# Altium integrated library GPDSE.IntLib: 426 symbols (part 4 of 5)
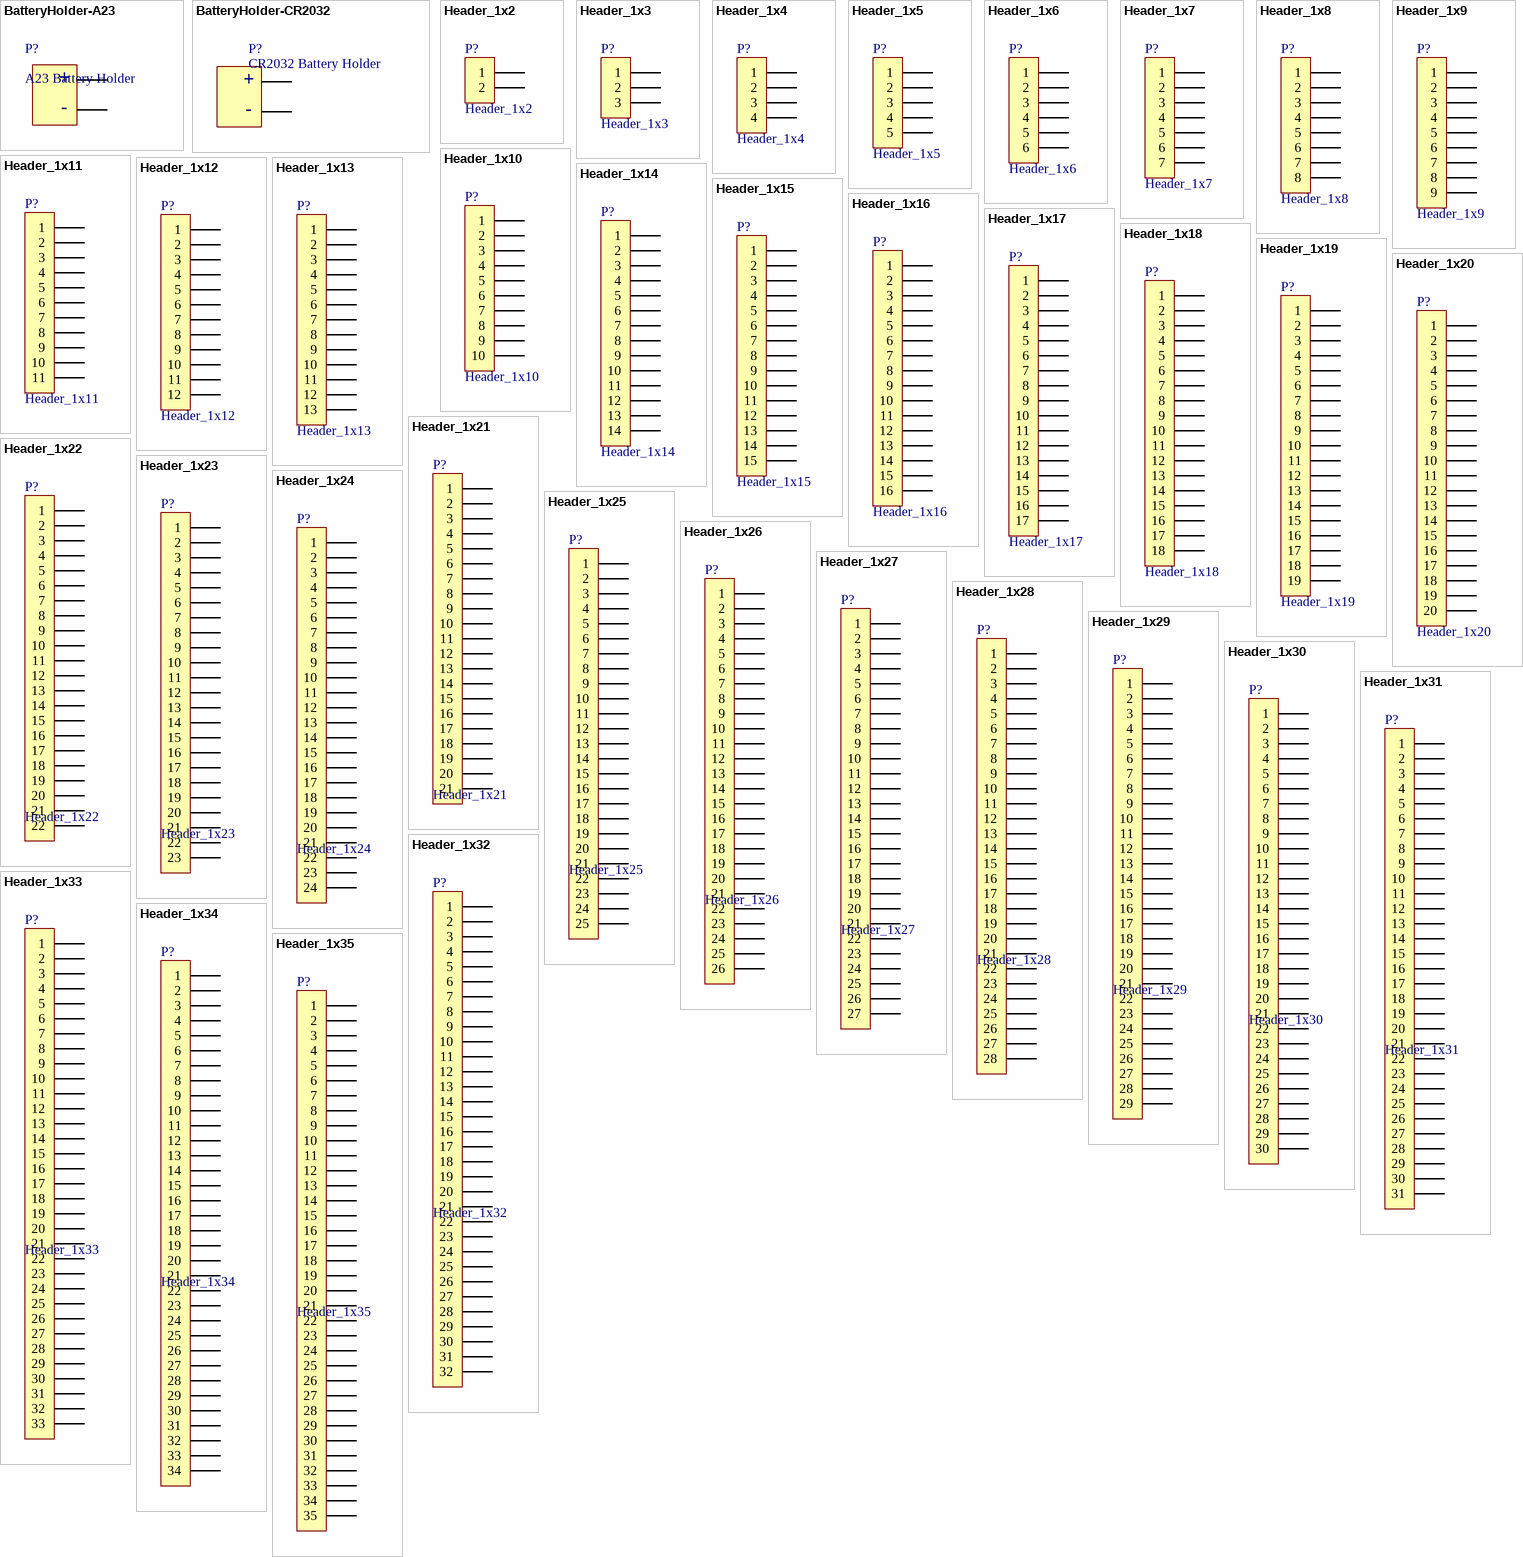
[diagram p29: symbols BatteryHolder-A23 to Header_1x35]

## Header_1x3
designator P?
Header, 1 Line, 3 Columns, 3 Pins; LatestRevisionDate: 17-Jul-2002; LatestRevisionNote: Re-released for DXP Platform.; Publisher: Altium Limited
footprint HDR-M-1x3-2.54mm-180-9.2mm (Male Header, 1 line 3 rows, 180 degrees, 9.2 mm length)
footprint HDR-M-1x3-2.54mm-180-11.2mm (Male Header, 1 line 3 rows, 180 degrees, 11.2 mm length)
footprint HDR-M-1x3-2.54mm-180-11.6mm (Male Header, 1 line 3 rows, 180 degrees, 11.6 mm length)
footprint HDR-M-1x3-2.54mm-180-12.4mm (Male Header, 1 line 3 rows, 180 degrees, 12.4 mm length)
footprint HDR-M-1x3-2.54mm-180-13.6mm (Male Header, 1 line 3 rows, 180 degrees, 13.6 mm length)
footprint HDR-M-1x3-2.54mm-180-21.1mm (Male Header, 1 line 3 rows, 180 degrees, 21.1 mm length)
footprint HDR-F-1x3-2.54mm-180-8.7mm (Female Header, 1 line 3 rows, 180 degrees, 8.7 mm length)
pins: 1, 2, 3

## Header_1x4
designator P?
Header, 1 Line, 4 Columns, 4 Pins; LatestRevisionDate: 17-Jul-2002; LatestRevisionNote: Re-released for DXP Platform.; Publisher: Altium Limited
footprint HDR-M-1x4-2.54mm-180-9.2mm (Male Header, 1 line 4 rows, 180 degrees, 9.2 mm length)
footprint HDR-M-1x4-2.54mm-180-11.2mm (Male Header, 1 line 4 rows, 180 degrees, 11.2 mm length)
footprint HDR-M-1x4-2.54mm-180-11.6mm (Male Header, 1 line 4 rows, 180 degrees, 11.6 mm length)
footprint HDR-M-1x4-2.54mm-180-12.4mm (Male Header, 1 line 4 rows, 180 degrees, 12.4 mm length)
footprint HDR-M-1x4-2.54mm-180-13.6mm (Male Header, 1 line 4 rows, 180 degrees, 13.6 mm length)
footprint HDR-M-1x4-2.54mm-180-21.1mm (Male Header, 1 line 4 rows, 180 degrees, 21.1 mm length)
footprint HDR-F-1x4-2.54mm-180-8.7mm (Female Header, 1 line 4 rows, 180 degrees, 8.7 mm length)
pins: 1, 2, 3, 4

## Header_1x5
designator P?
Header, 1 Line, 5 Columns, 5 Pins; LatestRevisionDate: 17-Jul-2002; LatestRevisionNote: Re-released for DXP Platform.; Publisher: Altium Limited
footprint HDR-M-1x5-2.54mm-180-9.2mm (Male Header, 1 line 5 rows, 180 degrees, 9.2 mm length)
footprint HDR-M-1x5-2.54mm-180-11.2mm (Male Header, 1 line 5 rows, 180 degrees, 11.2 mm length)
footprint HDR-M-1x5-2.54mm-180-11.6mm (Male Header, 1 line 5 rows, 180 degrees, 11.6 mm length)
footprint HDR-M-1x5-2.54mm-180-12.4mm (Male Header, 1 line 5 rows, 180 degrees, 12.4 mm length)
footprint HDR-M-1x5-2.54mm-180-13.6mm (Male Header, 1 line 5 rows, 180 degrees, 13.6 mm length)
footprint HDR-M-1x5-2.54mm-180-21.1mm (Male Header, 1 line 5 rows, 180 degrees, 21.1 mm length)
footprint HDR-F-1x5-2.54mm-180-8.7mm (Female Header, 1 line 5 rows, 180 degrees, 8.7 mm length)
pins: 1, 2, 3, 4, 5

## Header_1x6
designator P?
Header, 1 Line, 6 Columns, 6 Pins; LatestRevisionDate: 17-Jul-2002; LatestRevisionNote: Re-released for DXP Platform.; Publisher: Altium Limited
footprint HDR-M-1x6-2.54mm-180-9.2mm (Male Header, 1 line 6 rows, 180 degrees, 9.2 mm length)
footprint HDR-M-1x6-2.54mm-180-11.2mm (Male Header, 1 line 6 rows, 180 degrees, 11.2 mm length)
footprint HDR-M-1x6-2.54mm-180-11.6mm (Male Header, 1 line 6 rows, 180 degrees, 11.6 mm length)
footprint HDR-M-1x6-2.54mm-180-12.4mm (Male Header, 1 line 6 rows, 180 degrees, 12.4 mm length)
footprint HDR-M-1x6-2.54mm-180-13.6mm (Male Header, 1 line 6 rows, 180 degrees, 13.6 mm length)
footprint HDR-M-1x6-2.54mm-180-21.1mm (Male Header, 1 line 6 rows, 180 degrees, 21.1 mm length)
footprint HDR-F-1x6-2.54mm-180-8.7mm (Female Header, 1 line 6 rows, 180 degrees, 8.7 mm length)
pins: 1, 2, 3, 4, 5, 6

## Header_1x7
designator P?
Header, 1 Line, 7 Columns, 7 Pins; LatestRevisionDate: 17-Jul-2002; LatestRevisionNote: Re-released for DXP Platform.; Publisher: Altium Limited
footprint HDR-M-1x7-2.54mm-180-9.2mm (Male Header, 1 line 7 rows, 180 degrees, 9.2 mm length)
footprint HDR-M-1x7-2.54mm-180-11.2mm (Male Header, 1 line 7 rows, 180 degrees, 11.2 mm length)
footprint HDR-M-1x7-2.54mm-180-11.6mm (Male Header, 1 line 7 rows, 180 degrees, 11.6 mm length)
footprint HDR-M-1x7-2.54mm-180-12.4mm (Male Header, 1 line 7 rows, 180 degrees, 12.4 mm length)
footprint HDR-M-1x7-2.54mm-180-13.6mm (Male Header, 1 line 7 rows, 180 degrees, 13.6 mm length)
footprint HDR-M-1x7-2.54mm-180-21.1mm (Male Header, 1 line 7 rows, 180 degrees, 21.1 mm length)
footprint HDR-F-1x7-2.54mm-180-8.7mm (Female Header, 1 line 7 rows, 180 degrees, 8.7 mm length)
pins: 1, 2, 3, 4, 5, 6, 7

## Header_1x8
designator P?
Header, 1 Line, 8 Columns, 8 Pins; LatestRevisionDate: 17-Jul-2002; LatestRevisionNote: Re-released for DXP Platform.; Publisher: Altium Limited
footprint HDR-M-1x8-2.54mm-180-9.2mm (Male Header, 1 line 8 rows, 180 degrees, 9.2 mm length)
footprint HDR-M-1x8-2.54mm-180-11.2mm (Male Header, 1 line 8 rows, 180 degrees, 11.2 mm length)
footprint HDR-M-1x8-2.54mm-180-11.6mm (Male Header, 1 line 8 rows, 180 degrees, 11.6 mm length)
footprint HDR-M-1x8-2.54mm-180-12.4mm (Male Header, 1 line 8 rows, 180 degrees, 12.4 mm length)
footprint HDR-M-1x8-2.54mm-180-13.6mm (Male Header, 1 line 8 rows, 180 degrees, 13.6 mm length)
footprint HDR-M-1x8-2.54mm-180-21.1mm (Male Header, 1 line 8 rows, 180 degrees, 21.1 mm length)
footprint HDR-F-1x8-2.54mm-180-8.7mm (Female Header, 1 line 8 rows, 180 degrees, 8.7 mm length)
pins: 1, 2, 3, 4, 5, 6, 7, 8

## Header_1x9
designator P?
Header, 1 Line, 9 Columns, 9 Pins; LatestRevisionDate: 17-Jul-2002; LatestRevisionNote: Re-released for DXP Platform.; Publisher: Altium Limited
footprint HDR-M-1x9-2.54mm-180-9.2mm (Male Header, 1 line 9 rows, 180 degrees, 9.2 mm length)
footprint HDR-M-1x9-2.54mm-180-11.2mm (Male Header, 1 line 9 rows, 180 degrees, 11.2 mm length)
footprint HDR-M-1x9-2.54mm-180-11.6mm (Male Header, 1 line 9 rows, 180 degrees, 11.6 mm length)
footprint HDR-M-1x9-2.54mm-180-12.4mm (Male Header, 1 line 9 rows, 180 degrees, 12.4 mm length)
footprint HDR-M-1x9-2.54mm-180-13.6mm (Male Header, 1 line 9 rows, 180 degrees, 13.6 mm length)
footprint HDR-M-1x9-2.54mm-180-21.1mm (Male Header, 1 line 9 rows, 180 degrees, 21.1 mm length)
footprint HDR-F-1x9-2.54mm-180-8.7mm (Female Header, 1 line 9 rows, 180 degrees, 8.7 mm length)
pins: 1, 2, 3, 4, 5, 6, 7, 8, 9

## Header_1x10
designator P?
Header, 1 Line, 10 Columns, 10 Pins; LatestRevisionDate: 17-Jul-2002; LatestRevisionNote: Re-released for DXP Platform.; Publisher: Altium Limited
footprint HDR-M-1x10-2.54mm-180-9.2mm (Male Header, 1 line 10 rows, 180 degrees, 9.2 mm length)
footprint HDR-M-1x10-2.54mm-180-11.2mm (Male Header, 1 line 10 rows, 180 degrees, 11.2 mm length)
footprint HDR-M-1x10-2.54mm-180-11.6mm (Male Header, 1 line 10 rows, 180 degrees, 11.6 mm length)
footprint HDR-M-1x10-2.54mm-180-12.4mm (Male Header, 1 line 10 rows, 180 degrees, 12.4 mm length)
footprint HDR-M-1x10-2.54mm-180-13.6mm (Male Header, 1 line 10 rows, 180 degrees, 13.6 mm length)
footprint HDR-M-1x10-2.54mm-180-21.1mm (Male Header, 1 line 10 rows, 180 degrees, 21.1 mm length)
footprint HDR-F-1x10-2.54mm-180-8.7mm (Female Header, 1 line 10 rows, 180 degrees, 8.7 mm length)
pins: 1, 2, 3, 4, 5, 6, 7, 8, 9, 10

## Header_1x11
designator P?
Header, 1 Line, 11 Columns, 11 Pins; LatestRevisionDate: 17-Jul-2002; LatestRevisionNote: Re-released for DXP Platform.; Publisher: Altium Limited
footprint HDR-M-1x11-2.54mm-180-9.2mm (Male Header, 1 line 11 rows, 180 degrees, 9.2 mm length)
footprint HDR-M-1x11-2.54mm-180-11.2mm (Male Header, 1 line 11 rows, 180 degrees, 11.2 mm length)
footprint HDR-M-1x11-2.54mm-180-11.6mm (Male Header, 1 line 11 rows, 180 degrees, 11.6 mm length)
footprint HDR-M-1x11-2.54mm-180-12.4mm (Male Header, 1 line 11 rows, 180 degrees, 12.4 mm length)
footprint HDR-M-1x11-2.54mm-180-13.6mm (Male Header, 1 line 11 rows, 180 degrees, 13.6 mm length)
footprint HDR-M-1x11-2.54mm-180-21.1mm (Male Header, 1 line 11 rows, 180 degrees, 21.1 mm length)
footprint HDR-F-1x11-2.54mm-180-8.7mm (Female Header, 1 line 11 rows, 180 degrees, 8.7 mm length)
pins: 1, 2, 3, 4, 5, 6, 7, 8, 9, 10, 11

## Header_1x12
designator P?
Header, 1 Line, 12 Columns, 12 Pins; LatestRevisionDate: 17-Jul-2002; LatestRevisionNote: Re-released for DXP Platform.; Publisher: Altium Limited
footprint HDR-M-1x12-2.54mm-180-9.2mm (Male Header, 1 line 12 rows, 180 degrees, 9.2 mm length)
footprint HDR-M-1x12-2.54mm-180-11.2mm (Male Header, 1 line 12 rows, 180 degrees, 11.2 mm length)
footprint HDR-M-1x12-2.54mm-180-11.6mm (Male Header, 1 line 12 rows, 180 degrees, 11.6 mm length)
footprint HDR-M-1x12-2.54mm-180-12.4mm (Male Header, 1 line 12 rows, 180 degrees, 12.4 mm length)
footprint HDR-M-1x12-2.54mm-180-13.6mm (Male Header, 1 line 12 rows, 180 degrees, 13.6 mm length)
footprint HDR-M-1x12-2.54mm-180-21.1mm (Male Header, 1 line 12 rows, 180 degrees, 21.1 mm length)
footprint HDR-F-1x12-2.54mm-180-8.7mm (Female Header, 1 line 12 rows, 180 degrees, 8.7 mm length)
pins: 1, 2, 3, 4, 5, 6, 7, 8, 9, 10, 11, 12

## Header_1x13
designator P?
Header, 1 Line, 13 Columns, 13 Pins; LatestRevisionDate: 17-Jul-2002; LatestRevisionNote: Re-released for DXP Platform.; Publisher: Altium Limited
footprint HDR-M-1x13-2.54mm-180-9.2mm (Male Header, 1 line 13 rows, 180 degrees, 9.2 mm length)
footprint HDR-M-1x13-2.54mm-180-11.2mm (Male Header, 1 line 13 rows, 180 degrees, 11.2 mm length)
footprint HDR-M-1x13-2.54mm-180-11.6mm (Male Header, 1 line 13 rows, 180 degrees, 11.6 mm length)
footprint HDR-M-1x13-2.54mm-180-12.4mm (Male Header, 1 line 13 rows, 180 degrees, 12.4 mm length)
footprint HDR-M-1x13-2.54mm-180-13.6mm (Male Header, 1 line 13 rows, 180 degrees, 13.6 mm length)
footprint HDR-M-1x13-2.54mm-180-21.1mm (Male Header, 1 line 13 rows, 180 degrees, 21.1 mm length)
footprint HDR-F-1x13-2.54mm-180-8.7mm (Female Header, 1 line 13 rows, 180 degrees, 8.7 mm length)
pins: 1, 2, 3, 4, 5, 6, 7, 8, 9, 10, 11, 12, 13

## Header_1x14
designator P?
Header, 1 Line, 14 Columns, 14 Pins; LatestRevisionDate: 17-Jul-2002; LatestRevisionNote: Re-released for DXP Platform.; Publisher: Altium Limited
footprint HDR-M-1x14-2.54mm-180-9.2mm (Male Header, 1 line 14 rows, 180 degrees, 9.2 mm length)
footprint HDR-M-1x14-2.54mm-180-11.2mm (Male Header, 1 line 14 rows, 180 degrees, 11.2 mm length)
footprint HDR-M-1x14-2.54mm-180-11.6mm (Male Header, 1 line 14 rows, 180 degrees, 11.6 mm length)
footprint HDR-M-1x14-2.54mm-180-12.4mm (Male Header, 1 line 14 rows, 180 degrees, 12.4 mm length)
footprint HDR-M-1x14-2.54mm-180-13.6mm (Male Header, 1 line 14 rows, 180 degrees, 13.6 mm length)
footprint HDR-M-1x14-2.54mm-180-21.1mm (Male Header, 1 line 14 rows, 180 degrees, 21.1 mm length)
footprint HDR-F-1x14-2.54mm-180-8.7mm (Female Header, 1 line 14 rows, 180 degrees, 8.7 mm length)
pins: 1, 2, 3, 4, 5, 6, 7, 8, 9, 10, 11, 12, 13, 14

## Header_1x15
designator P?
Header, 1 Line, 15 Columns, 15 Pins; LatestRevisionDate: 17-Jul-2002; LatestRevisionNote: Re-released for DXP Platform.; Publisher: Altium Limited
footprint HDR-M-1x15-2.54mm-180-9.2mm (Male Header, 1 line 15 rows, 180 degrees, 9.2 mm length)
footprint HDR-M-1x15-2.54mm-180-11.2mm (Male Header, 1 line 15 rows, 180 degrees, 11.2 mm length)
footprint HDR-M-1x15-2.54mm-180-11.6mm (Male Header, 1 line 15 rows, 180 degrees, 11.6 mm length)
footprint HDR-M-1x15-2.54mm-180-12.4mm (Male Header, 1 line 15 rows, 180 degrees, 12.4 mm length)
footprint HDR-M-1x15-2.54mm-180-13.6mm (Male Header, 1 line 15 rows, 180 degrees, 13.6 mm length)
footprint HDR-M-1x15-2.54mm-180-21.1mm (Male Header, 1 line 15 rows, 180 degrees, 21.1 mm length)
footprint HDR-F-1x15-2.54mm-180-8.7mm (Female Header, 1 line 15 rows, 180 degrees, 8.7 mm length)
pins: 1, 2, 3, 4, 5, 6, 7, 8, 9, 10, 11, 12, 13, 14, 15

## Header_1x16
designator P?
Header, 1 Line, 16 Columns, 16 Pins; LatestRevisionDate: 17-Jul-2002; LatestRevisionNote: Re-released for DXP Platform.; Publisher: Altium Limited
footprint HDR-M-1x16-2.54mm-180-9.2mm (Male Header, 1 line 16 rows, 180 degrees, 9.2 mm length)
footprint HDR-M-1x16-2.54mm-180-11.2mm (Male Header, 1 line 16 rows, 180 degrees, 11.2 mm length)
footprint HDR-M-1x16-2.54mm-180-11.6mm (Male Header, 1 line 16 rows, 180 degrees, 11.6 mm length)
footprint HDR-M-1x16-2.54mm-180-12.4mm (Male Header, 1 line 16 rows, 180 degrees, 12.4 mm length)
footprint HDR-M-1x16-2.54mm-180-13.6mm (Male Header, 1 line 16 rows, 180 degrees, 13.6 mm length)
footprint HDR-M-1x16-2.54mm-180-21.1mm (Male Header, 1 line 16 rows, 180 degrees, 21.1 mm length)
footprint HDR-F-1x16-2.54mm-180-8.7mm (Female Header, 1 line 16 rows, 180 degrees, 8.7 mm length)
pins: 1, 2, 3, 4, 5, 6, 7, 8, 9, 10, 11, 12, 13, 14, 15, 16

## Header_1x17
designator P?
Header, 1 Line, 17 Columns, 17 Pins; LatestRevisionDate: 17-Jul-2002; LatestRevisionNote: Re-released for DXP Platform.; Publisher: Altium Limited
footprint HDR-M-1x17-2.54mm-180-9.2mm (Male Header, 1 line 17 rows, 180 degrees, 9.2 mm length)
footprint HDR-M-1x17-2.54mm-180-11.2mm (Male Header, 1 line 17 rows, 180 degrees, 11.2 mm length)
footprint HDR-M-1x17-2.54mm-180-11.6mm (Male Header, 1 line 17 rows, 180 degrees, 11.6 mm length)
footprint HDR-M-1x17-2.54mm-180-12.4mm (Male Header, 1 line 17 rows, 180 degrees, 12.4 mm length)
footprint HDR-M-1x17-2.54mm-180-13.6mm (Male Header, 1 line 17 rows, 180 degrees, 13.6 mm length)
footprint HDR-M-1x17-2.54mm-180-21.1mm (Male Header, 1 line 17 rows, 180 degrees, 21.1 mm length)
footprint HDR-F-1x17-2.54mm-180-8.7mm (Female Header, 1 line 17 rows, 180 degrees, 8.7 mm length)
pins: 1, 2, 3, 4, 5, 6, 7, 8, 9, 10, 11, 12, 13, 14, 15, 16, 17

## Header_1x18
designator P?
Header, 1 Line, 18 Columns, 18 Pins; LatestRevisionDate: 17-Jul-2002; LatestRevisionNote: Re-released for DXP Platform.; Publisher: Altium Limited
footprint HDR-M-1x18-2.54mm-180-9.2mm (Male Header, 1 line 18 rows, 180 degrees, 9.2 mm length)
footprint HDR-M-1x18-2.54mm-180-11.2mm (Male Header, 1 line 18 rows, 180 degrees, 11.2 mm length)
footprint HDR-M-1x18-2.54mm-180-11.6mm (Male Header, 1 line 18 rows, 180 degrees, 11.6 mm length)
footprint HDR-M-1x18-2.54mm-180-12.4mm (Male Header, 1 line 18 rows, 180 degrees, 12.4 mm length)
footprint HDR-M-1x18-2.54mm-180-13.6mm (Male Header, 1 line 18 rows, 180 degrees, 13.6 mm length)
footprint HDR-M-1x18-2.54mm-180-21.1mm (Male Header, 1 line 18 rows, 180 degrees, 21.1 mm length)
footprint HDR-F-1x18-2.54mm-180-8.7mm (Female Header, 1 line 18 rows, 180 degrees, 8.7 mm length)
pins: 1, 2, 3, 4, 5, 6, 7, 8, 9, 10, 11, 12, 13, 14, 15, 16, 17, 18

## Header_1x19
designator P?
Header, 1 Line, 19 Columns, 19 Pins; LatestRevisionDate: 17-Jul-2002; LatestRevisionNote: Re-released for DXP Platform.; Publisher: Altium Limited
footprint HDR-M-1x19-2.54mm-180-9.2mm (Male Header, 1 line 19 rows, 180 degrees, 9.2 mm length)
footprint HDR-M-1x19-2.54mm-180-11.2mm (Male Header, 1 line 19 rows, 180 degrees, 11.2 mm length)
footprint HDR-M-1x19-2.54mm-180-11.6mm (Male Header, 1 line 19 rows, 180 degrees, 11.6 mm length)
footprint HDR-M-1x19-2.54mm-180-12.4mm (Male Header, 1 line 19 rows, 180 degrees, 12.4 mm length)
footprint HDR-M-1x19-2.54mm-180-13.6mm (Male Header, 1 line 19 rows, 180 degrees, 13.6 mm length)
footprint HDR-M-1x19-2.54mm-180-21.1mm (Male Header, 1 line 19 rows, 180 degrees, 21.1 mm length)
footprint HDR-F-1x19-2.54mm-180-8.7mm (Female Header, 1 line 19 rows, 180 degrees, 8.7 mm length)
pins: 1, 2, 3, 4, 5, 6, 7, 8, 9, 10, 11, 12, 13, 14, 15, 16, 17, 18, 19

## Header_1x20
designator P?
Header, 1 Line, 20 Columns, 20 Pins; LatestRevisionDate: 17-Jul-2002; LatestRevisionNote: Re-released for DXP Platform.; Publisher: Altium Limited
footprint HDR-M-1x20-2.54mm-180-9.2mm (Male Header, 1 line 20 rows, 180 degrees, 9.2 mm length)
footprint HDR-M-1x20-2.54mm-180-11.2mm (Male Header, 1 line 20 rows, 180 degrees, 11.2 mm length)
footprint HDR-M-1x20-2.54mm-180-11.6mm (Male Header, 1 line 20 rows, 180 degrees, 11.6 mm length)
footprint HDR-M-1x20-2.54mm-180-12.4mm (Male Header, 1 line 20 rows, 180 degrees, 12.4 mm length)
footprint HDR-M-1x20-2.54mm-180-13.6mm (Male Header, 1 line 20 rows, 180 degrees, 13.6 mm length)
footprint HDR-M-1x20-2.54mm-180-21.1mm (Male Header, 1 line 20 rows, 180 degrees, 21.1 mm length)
footprint HDR-F-1x20-2.54mm-180-8.7mm (Female Header, 1 line 20 rows, 180 degrees, 8.7 mm length)
pins: 1, 2, 3, 4, 5, 6, 7, 8, 9, 10, 11, 12, 13, 14, 15, 16, 17, 18, 19, 20

## Header_1x21
designator P?
Header, 1 Line, 21 Columns, 21 Pins; LatestRevisionDate: 17-Jul-2002; LatestRevisionNote: Re-released for DXP Platform.; Publisher: Altium Limited
footprint HDR-M-1x21-2.54mm-180-9.2mm (Male Header, 1 line 21 rows, 180 degrees, 9.2 mm length)
footprint HDR-M-1x21-2.54mm-180-11.2mm (Male Header, 1 line 21 rows, 180 degrees, 11.2 mm length)
footprint HDR-M-1x21-2.54mm-180-11.6mm (Male Header, 1 line 21 rows, 180 degrees, 11.6 mm length)
footprint HDR-M-1x21-2.54mm-180-12.4mm (Male Header, 1 line 21 rows, 180 degrees, 12.4 mm length)
footprint HDR-M-1x21-2.54mm-180-13.6mm (Male Header, 1 line 21 rows, 180 degrees, 13.6 mm length)
footprint HDR-M-1x21-2.54mm-180-21.1mm (Male Header, 1 line 21 rows, 180 degrees, 21.1 mm length)
footprint HDR-F-1x21-2.54mm-180-8.7mm (Female Header, 1 line 21 rows, 180 degrees, 8.7 mm length)
pins: 1, 2, 3, 4, 5, 6, 7, 8, 9, 10, 11, 12, 13, 14, 15, 16, 17, 18, 19, 20, 21

## Header_1x22
designator P?
Header, 1 Line, 22 Columns, 22 Pins; LatestRevisionDate: 17-Jul-2002; LatestRevisionNote: Re-released for DXP Platform.; Publisher: Altium Limited
footprint HDR-M-1x22-2.54mm-180-9.2mm (Male Header, 1 line 22 rows, 180 degrees, 9.2 mm length)
footprint HDR-M-1x22-2.54mm-180-11.2mm (Male Header, 1 line 22 rows, 180 degrees, 11.2 mm length)
footprint HDR-M-1x22-2.54mm-180-11.6mm (Male Header, 1 line 22 rows, 180 degrees, 11.6 mm length)
footprint HDR-M-1x22-2.54mm-180-12.4mm (Male Header, 1 line 22 rows, 180 degrees, 12.4 mm length)
footprint HDR-M-1x22-2.54mm-180-13.6mm (Male Header, 1 line 22 rows, 180 degrees, 13.6 mm length)
footprint HDR-M-1x22-2.54mm-180-21.1mm (Male Header, 1 line 22 rows, 180 degrees, 21.1 mm length)
footprint HDR-F-1x22-2.54mm-180-8.7mm (Female Header, 1 line 22 rows, 180 degrees, 8.7 mm length)
pins: 1, 2, 3, 4, 5, 6, 7, 8, 9, 10, 11, 12, 13, 14, 15, 16, 17, 18, 19, 20, 21, 22

## Header_1x23
designator P?
Header, 1 Line, 23 Columns, 23 Pins; LatestRevisionDate: 17-Jul-2002; LatestRevisionNote: Re-released for DXP Platform.; Publisher: Altium Limited
footprint HDR-M-1x23-2.54mm-180-9.2mm (Male Header, 1 line 23 rows, 180 degrees, 9.2 mm length)
footprint HDR-M-1x23-2.54mm-180-11.2mm (Male Header, 1 line 23 rows, 180 degrees, 11.2 mm length)
footprint HDR-M-1x23-2.54mm-180-11.6mm (Male Header, 1 line 23 rows, 180 degrees, 11.6 mm length)
footprint HDR-M-1x23-2.54mm-180-12.4mm (Male Header, 1 line 23 rows, 180 degrees, 12.4 mm length)
footprint HDR-M-1x23-2.54mm-180-13.6mm (Male Header, 1 line 23 rows, 180 degrees, 13.6 mm length)
footprint HDR-M-1x23-2.54mm-180-21.1mm (Male Header, 1 line 23 rows, 180 degrees, 21.1 mm length)
footprint HDR-F-1x23-2.54mm-180-8.7mm (Female Header, 1 line 23 rows, 180 degrees, 8.7 mm length)
pins: 1, 2, 3, 4, 5, 6, 7, 8, 9, 10, 11, 12, 13, 14, 15, 16, 17, 18, 19, 20, 21, 22, 23

## Header_1x24
designator P?
Header, 1 Line, 24 Columns, 24 Pins; LatestRevisionDate: 17-Jul-2002; LatestRevisionNote: Re-released for DXP Platform.; Publisher: Altium Limited
footprint HDR-M-1x24-2.54mm-180-9.2mm (Male Header, 1 line 24 rows, 180 degrees, 9.2 mm length)
footprint HDR-M-1x24-2.54mm-180-11.2mm (Male Header, 1 line 24 rows, 180 degrees, 11.2 mm length)
footprint HDR-M-1x24-2.54mm-180-11.6mm (Male Header, 1 line 24 rows, 180 degrees, 11.6 mm length)
footprint HDR-M-1x24-2.54mm-180-12.4mm (Male Header, 1 line 24 rows, 180 degrees, 12.4 mm length)
footprint HDR-M-1x24-2.54mm-180-13.6mm (Male Header, 1 line 24 rows, 180 degrees, 13.6 mm length)
footprint HDR-M-1x24-2.54mm-180-21.1mm (Male Header, 1 line 24 rows, 180 degrees, 21.1 mm length)
footprint HDR-F-1x24-2.54mm-180-8.7mm (Female Header, 1 line 24 rows, 180 degrees, 8.7 mm length)
pins: 1, 2, 3, 4, 5, 6, 7, 8, 9, 10, 11, 12, 13, 14, 15, 16, 17, 18, 19, 20, 21, 22, 23, 24

## Header_1x25
designator P?
Header, 1 Line, 25 Columns, 25 Pins; LatestRevisionDate: 17-Jul-2002; LatestRevisionNote: Re-released for DXP Platform.; Publisher: Altium Limited
footprint HDR-M-1x25-2.54mm-180-9.2mm (Male Header, 1 line 25 rows, 180 degrees, 9.2 mm length)
footprint HDR-M-1x25-2.54mm-180-11.2mm (Male Header, 1 line 25 rows, 180 degrees, 11.2 mm length)
footprint HDR-M-1x25-2.54mm-180-11.6mm (Male Header, 1 line 25 rows, 180 degrees, 11.6 mm length)
footprint HDR-M-1x25-2.54mm-180-12.4mm (Male Header, 1 line 25 rows, 180 degrees, 12.4 mm length)
footprint HDR-M-1x25-2.54mm-180-13.6mm (Male Header, 1 line 25 rows, 180 degrees, 13.6 mm length)
footprint HDR-M-1x25-2.54mm-180-21.1mm (Male Header, 1 line 25 rows, 180 degrees, 21.1 mm length)
footprint HDR-F-1x25-2.54mm-180-8.7mm (Female Header, 1 line 25 rows, 180 degrees, 8.7 mm length)
pins: 1, 2, 3, 4, 5, 6, 7, 8, 9, 10, 11, 12, 13, 14, 15, 16, 17, 18, 19, 20, 21, 22, 23, 24, 25

## Header_1x26
designator P?
Header, 1 Line, 26 Columns, 26 Pins; LatestRevisionDate: 17-Jul-2002; LatestRevisionNote: Re-released for DXP Platform.; Publisher: Altium Limited
footprint HDR-M-1x26-2.54mm-180-9.2mm (Male Header, 1 line 26 rows, 180 degrees, 9.2 mm length)
footprint HDR-M-1x26-2.54mm-180-11.2mm (Male Header, 1 line 26 rows, 180 degrees, 11.2 mm length)
footprint HDR-M-1x26-2.54mm-180-11.6mm (Male Header, 1 line 26 rows, 180 degrees, 11.6 mm length)
footprint HDR-M-1x26-2.54mm-180-12.4mm (Male Header, 1 line 26 rows, 180 degrees, 12.4 mm length)
footprint HDR-M-1x26-2.54mm-180-13.6mm (Male Header, 1 line 26 rows, 180 degrees, 13.6 mm length)
footprint HDR-M-1x26-2.54mm-180-21.1mm (Male Header, 1 line 26 rows, 180 degrees, 21.1 mm length)
footprint HDR-F-1x26-2.54mm-180-8.7mm (Female Header, 1 line 26 rows, 180 degrees, 8.7 mm length)
pins: 1, 2, 3, 4, 5, 6, 7, 8, 9, 10, 11, 12, 13, 14, 15, 16, 17, 18, 19, 20, 21, 22, 23, 24, 25, 26

## Header_1x27
designator P?
Header, 1 Line, 27 Columns, 27 Pins; LatestRevisionDate: 17-Jul-2002; LatestRevisionNote: Re-released for DXP Platform.; Publisher: Altium Limited
footprint HDR-M-1x27-2.54mm-180-9.2mm (Male Header, 1 line 27 rows, 180 degrees, 9.2 mm length)
footprint HDR-M-1x27-2.54mm-180-11.2mm (Male Header, 1 line 27 rows, 180 degrees, 11.2 mm length)
footprint HDR-M-1x27-2.54mm-180-11.6mm (Male Header, 1 line 27 rows, 180 degrees, 11.6 mm length)
footprint HDR-M-1x27-2.54mm-180-12.4mm (Male Header, 1 line 27 rows, 180 degrees, 12.4 mm length)
footprint HDR-M-1x27-2.54mm-180-13.6mm (Male Header, 1 line 27 rows, 180 degrees, 13.6 mm length)
footprint HDR-M-1x27-2.54mm-180-21.1mm (Male Header, 1 line 27 rows, 180 degrees, 21.1 mm length)
footprint HDR-F-1x27-2.54mm-180-8.7mm (Female Header, 1 line 27 rows, 180 degrees, 8.7 mm length)
pins: 1, 2, 3, 4, 5, 6, 7, 8, 9, 10, 11, 12, 13, 14, 15, 16, 17, 18, 19, 20, 21, 22, 23, 24, 25, 26, 27

## Header_1x28
designator P?
Header, 1 Line, 28 Columns, 28 Pins; LatestRevisionDate: 17-Jul-2002; LatestRevisionNote: Re-released for DXP Platform.; Publisher: Altium Limited
footprint HDR-M-1x28-2.54mm-180-9.2mm (Male Header, 1 line 28 rows, 180 degrees, 9.2 mm length)
footprint HDR-M-1x28-2.54mm-180-11.2mm (Male Header, 1 line 28 rows, 180 degrees, 11.2 mm length)
footprint HDR-M-1x28-2.54mm-180-11.6mm (Male Header, 1 line 28 rows, 180 degrees, 11.6 mm length)
footprint HDR-M-1x28-2.54mm-180-12.4mm (Male Header, 1 line 28 rows, 180 degrees, 12.4 mm length)
footprint HDR-M-1x28-2.54mm-180-13.6mm (Male Header, 1 line 28 rows, 180 degrees, 13.6 mm length)
footprint HDR-M-1x28-2.54mm-180-21.1mm (Male Header, 1 line 28 rows, 180 degrees, 21.1 mm length)
footprint HDR-F-1x28-2.54mm-180-8.7mm (Female Header, 1 line 28 rows, 180 degrees, 8.7 mm length)
pins: 1, 2, 3, 4, 5, 6, 7, 8, 9, 10, 11, 12, 13, 14, 15, 16, 17, 18, 19, 20, 21, 22, 23, 24, 25, 26, 27, 28

## Header_1x29
designator P?
Header, 1 Line, 29 Columns, 29 Pins; LatestRevisionDate: 17-Jul-2002; LatestRevisionNote: Re-released for DXP Platform.; Publisher: Altium Limited
footprint HDR-M-1x29-2.54mm-180-9.2mm (Male Header, 1 line 29 rows, 180 degrees, 9.2 mm length)
footprint HDR-M-1x29-2.54mm-180-11.2mm (Male Header, 1 line 29 rows, 180 degrees, 11.2 mm length)
footprint HDR-M-1x29-2.54mm-180-11.6mm (Male Header, 1 line 29 rows, 180 degrees, 11.6 mm length)
footprint HDR-M-1x29-2.54mm-180-12.4mm (Male Header, 1 line 29 rows, 180 degrees, 12.4 mm length)
footprint HDR-M-1x29-2.54mm-180-13.6mm (Male Header, 1 line 29 rows, 180 degrees, 13.6 mm length)
footprint HDR-M-1x29-2.54mm-180-21.1mm (Male Header, 1 line 29 rows, 180 degrees, 21.1 mm length)
footprint HDR-F-1x29-2.54mm-180-8.7mm (Female Header, 1 line 29 rows, 180 degrees, 8.7 mm length)
pins: 1, 2, 3, 4, 5, 6, 7, 8, 9, 10, 11, 12, 13, 14, 15, 16, 17, 18, 19, 20, 21, 22, 23, 24, 25, 26, 27, 28, 29

## Header_1x30
designator P?
Header, 1 Line, 30 Columns, 30 Pins; LatestRevisionDate: 17-Jul-2002; LatestRevisionNote: Re-released for DXP Platform.; Publisher: Altium Limited
footprint HDR-M-1x30-2.54mm-180-9.2mm (Male Header, 1 line 30 rows, 180 degrees, 9.2 mm length)
footprint HDR-M-1x30-2.54mm-180-11.2mm (Male Header, 1 line 30 rows, 180 degrees, 11.2 mm length)
footprint HDR-M-1x30-2.54mm-180-11.6mm (Male Header, 1 line 30 rows, 180 degrees, 11.6 mm length)
footprint HDR-M-1x30-2.54mm-180-12.4mm (Male Header, 1 line 30 rows, 180 degrees, 12.4 mm length)
footprint HDR-M-1x30-2.54mm-180-13.6mm (Male Header, 1 line 30 rows, 180 degrees, 13.6 mm length)
footprint HDR-M-1x30-2.54mm-180-21.1mm (Male Header, 1 line 30 rows, 180 degrees, 21.1 mm length)
footprint HDR-F-1x30-2.54mm-180-8.7mm (Female Header, 1 line 30 rows, 180 degrees, 8.7 mm length)
pins: 1, 2, 3, 4, 5, 6, 7, 8, 9, 10, 11, 12, 13, 14, 15, 16, 17, 18, 19, 20, 21, 22, 23, 24, 25, 26, 27, 28, 29, 30

## Header_1x31
designator P?
Header, 1 Line, 31 Columns, 31 Pins; LatestRevisionDate: 17-Jul-2002; LatestRevisionNote: Re-released for DXP Platform.; Publisher: Altium Limited
footprint HDR-M-1x31-2.54mm-180-9.2mm (Male Header, 1 line 31 rows, 180 degrees, 9.2 mm length)
footprint HDR-M-1x31-2.54mm-180-11.2mm (Male Header, 1 line 31 rows, 180 degrees, 11.2 mm length)
footprint HDR-M-1x31-2.54mm-180-11.6mm (Male Header, 1 line 31 rows, 180 degrees, 11.6 mm length)
footprint HDR-M-1x31-2.54mm-180-12.4mm (Male Header, 1 line 31 rows, 180 degrees, 12.4 mm length)
footprint HDR-M-1x31-2.54mm-180-13.6mm (Male Header, 1 line 31 rows, 180 degrees, 13.6 mm length)
footprint HDR-M-1x31-2.54mm-180-21.1mm (Male Header, 1 line 31 rows, 180 degrees, 21.1 mm length)
footprint HDR-F-1x31-2.54mm-180-8.7mm (Female Header, 1 line 31 rows, 180 degrees, 8.7 mm length)
pins: 1, 2, 3, 4, 5, 6, 7, 8, 9, 10, 11, 12, 13, 14, 15, 16, 17, 18, 19, 20, 21, 22, 23, 24, 25, 26, 27, 28, 29, 30, 31

## Header_1x32
designator P?
Header, 1 Line, 32 Columns, 32 Pins; LatestRevisionDate: 17-Jul-2002; LatestRevisionNote: Re-released for DXP Platform.; Publisher: Altium Limited
footprint HDR-M-1x32-2.54mm-180-9.2mm (Male Header, 1 line 32 rows, 180 degrees, 9.2 mm length)
footprint HDR-M-1x32-2.54mm-180-11.2mm (Male Header, 1 line 32 rows, 180 degrees, 11.2 mm length)
footprint HDR-M-1x32-2.54mm-180-11.6mm (Male Header, 1 line 32 rows, 180 degrees, 11.6 mm length)
footprint HDR-M-1x32-2.54mm-180-12.4mm (Male Header, 1 line 32 rows, 180 degrees, 12.4 mm length)
footprint HDR-M-1x32-2.54mm-180-13.6mm (Male Header, 1 line 32 rows, 180 degrees, 13.6 mm length)
footprint HDR-M-1x32-2.54mm-180-21.1mm (Male Header, 1 line 32 rows, 180 degrees, 21.1 mm length)
footprint HDR-F-1x32-2.54mm-180-8.7mm (Female Header, 1 line 32 rows, 180 degrees, 8.7 mm length)
pins: 1, 2, 3, 4, 5, 6, 7, 8, 9, 10, 11, 12, 13, 14, 15, 16, 17, 18, 19, 20, 21, 22, 23, 24, 25, 26, 27, 28, 29, 30, 31, 32

## Header_1x33
designator P?
Header, 1 Line, 33 Columns, 33 Pins; LatestRevisionDate: 17-Jul-2002; LatestRevisionNote: Re-released for DXP Platform.; Publisher: Altium Limited
footprint HDR-M-1x33-2.54mm-180-9.2mm (Male Header, 1 line 33 rows, 180 degrees, 9.2 mm length)
footprint HDR-M-1x33-2.54mm-180-11.2mm (Male Header, 1 line 33 rows, 180 degrees, 11.2 mm length)
footprint HDR-M-1x33-2.54mm-180-11.6mm (Male Header, 1 line 33 rows, 180 degrees, 11.6 mm length)
footprint HDR-M-1x33-2.54mm-180-12.4mm (Male Header, 1 line 33 rows, 180 degrees, 12.4 mm length)
footprint HDR-M-1x33-2.54mm-180-13.6mm (Male Header, 1 line 33 rows, 180 degrees, 13.6 mm length)
footprint HDR-M-1x33-2.54mm-180-21.1mm (Male Header, 1 line 33 rows, 180 degrees, 21.1 mm length)
footprint HDR-F-1x33-2.54mm-180-8.7mm (Female Header, 1 line 33 rows, 180 degrees, 8.7 mm length)
pins: 1, 2, 3, 4, 5, 6, 7, 8, 9, 10, 11, 12, 13, 14, 15, 16, 17, 18, 19, 20, 21, 22, 23, 24, 25, 26, 27, 28, 29, 30, 31, 32, 33

## Header_1x34
designator P?
Header, 1 Line, 34 Columns, 34 Pins; LatestRevisionDate: 17-Jul-2002; LatestRevisionNote: Re-released for DXP Platform.; Publisher: Altium Limited
footprint HDR-M-1x34-2.54mm-180-9.2mm (Male Header, 1 line 34 rows, 180 degrees, 9.2 mm length)
footprint HDR-M-1x34-2.54mm-180-11.2mm (Male Header, 1 line 34 rows, 180 degrees, 11.2 mm length)
footprint HDR-M-1x34-2.54mm-180-11.6mm (Male Header, 1 line 34 rows, 180 degrees, 11.6 mm length)
footprint HDR-M-1x34-2.54mm-180-12.4mm (Male Header, 1 line 34 rows, 180 degrees, 12.4 mm length)
footprint HDR-M-1x34-2.54mm-180-13.6mm (Male Header, 1 line 34 rows, 180 degrees, 13.6 mm length)
footprint HDR-M-1x34-2.54mm-180-21.1mm (Male Header, 1 line 34 rows, 180 degrees, 21.1 mm length)
footprint HDR-F-1x34-2.54mm-180-8.7mm (Female Header, 1 line 34 rows, 180 degrees, 8.7 mm length)
pins: 1, 2, 3, 4, 5, 6, 7, 8, 9, 10, 11, 12, 13, 14, 15, 16, 17, 18, 19, 20, 21, 22, 23, 24, 25, 26, 27, 28, 29, 30, 31, 32, 33, 34

## Header_1x35
designator P?
Header, 1 Line, 35 Columns, 35 Pins; LatestRevisionDate: 17-Jul-2002; LatestRevisionNote: Re-released for DXP Platform.; Publisher: Altium Limited
footprint HDR-M-1x35-2.54mm-180-9.2mm (Male Header, 1 line 35 rows, 180 degrees, 9.2 mm length)
footprint HDR-M-1x35-2.54mm-180-11.2mm (Male Header, 1 line 35 rows, 180 degrees, 11.2 mm length)
footprint HDR-M-1x35-2.54mm-180-11.6mm (Male Header, 1 line 35 rows, 180 degrees, 11.6 mm length)
footprint HDR-M-1x35-2.54mm-180-12.4mm (Male Header, 1 line 35 rows, 180 degrees, 12.4 mm length)
footprint HDR-M-1x35-2.54mm-180-13.6mm (Male Header, 1 line 35 rows, 180 degrees, 13.6 mm length)
footprint HDR-M-1x35-2.54mm-180-21.1mm (Male Header, 1 line 35 rows, 180 degrees, 21.1 mm length)
footprint HDR-F-1x35-2.54mm-180-8.7mm (Female Header, 1 line 35 rows, 180 degrees, 8.7 mm length)
pins: 1, 2, 3, 4, 5, 6, 7, 8, 9, 10, 11, 12, 13, 14, 15, 16, 17, 18, 19, 20, 21, 22, 23, 24, 25, 26, 27, 28, 29, 30, 31, 32, 33, 34, 35

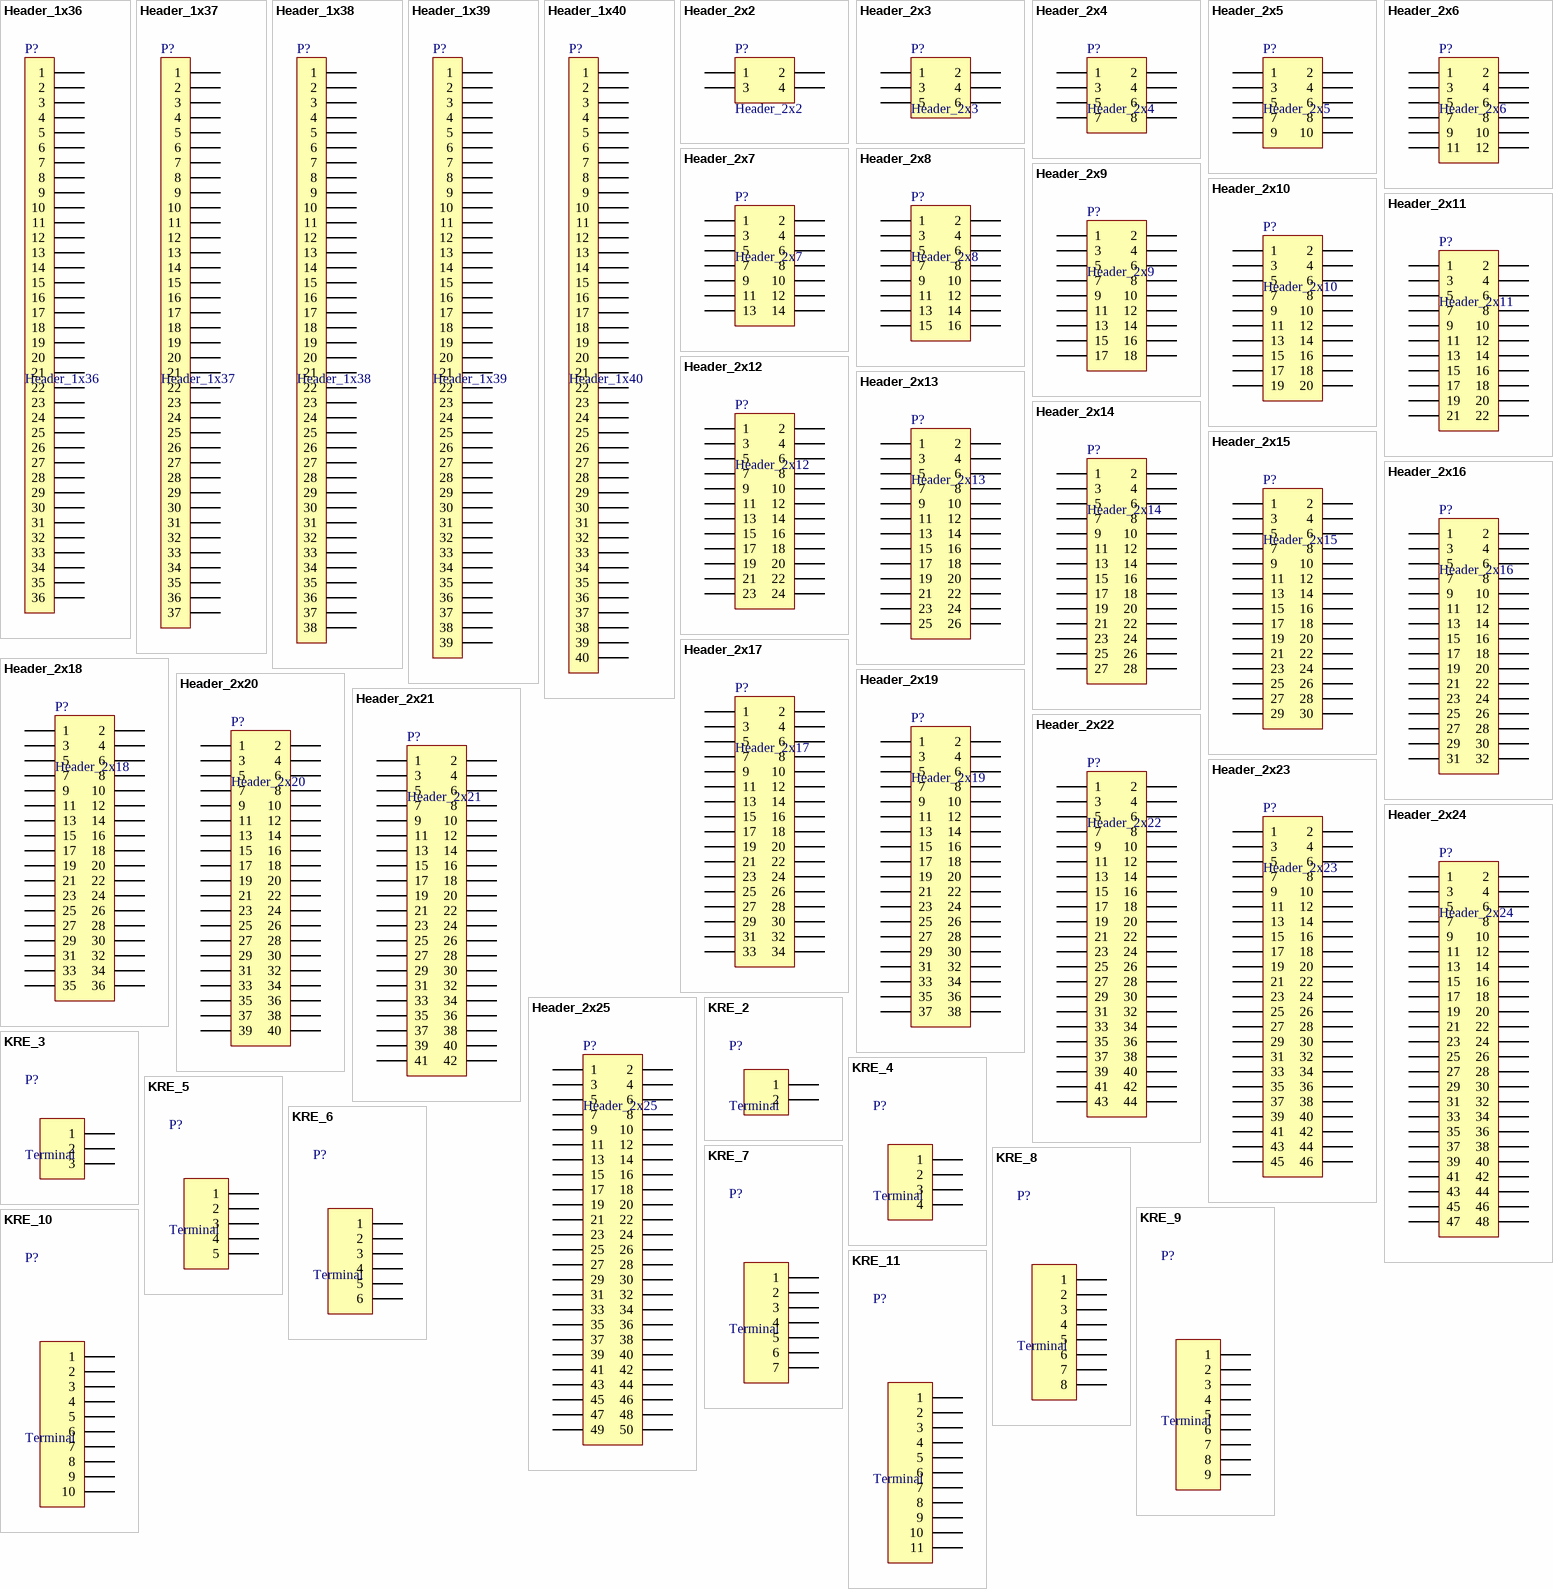
[diagram p16: symbols Header_1x36 to KRE_11]

## Header_1x36
designator P?
Header, 1 Line, 36 Columns, 36 Pins; LatestRevisionDate: 17-Jul-2002; LatestRevisionNote: Re-released for DXP Platform.; Publisher: Altium Limited
footprint HDR-M-1x36-2.54mm-180-9.2mm (Male Header, 1 line 36 rows, 180 degrees, 9.2 mm length)
footprint HDR-M-1x36-2.54mm-180-11.2mm (Male Header, 1 line 36 rows, 180 degrees, 11.2 mm length)
footprint HDR-M-1x36-2.54mm-180-11.6mm (Male Header, 1 line 36 rows, 180 degrees, 11.6 mm length)
footprint HDR-M-1x36-2.54mm-180-12.4mm (Male Header, 1 line 36 rows, 180 degrees, 12.4 mm length)
footprint HDR-M-1x36-2.54mm-180-13.6mm (Male Header, 1 line 36 rows, 180 degrees, 13.6 mm length)
footprint HDR-M-1x36-2.54mm-180-21.1mm (Male Header, 1 line 36 rows, 180 degrees, 21.1 mm length)
footprint HDR-F-1x36-2.54mm-180-8.7mm (Female Header, 1 line 36 rows, 180 degrees, 8.7 mm length)
pins: 1, 2, 3, 4, 5, 6, 7, 8, 9, 10, 11, 12, 13, 14, 15, 16, 17, 18, 19, 20, 21, 22, 23, 24, 25, 26, 27, 28, 29, 30, 31, 32, 33, 34, 35, 36

## Header_1x37
designator P?
Header, 1 Line, 37 Columns, 37 Pins; LatestRevisionDate: 17-Jul-2002; LatestRevisionNote: Re-released for DXP Platform.; Publisher: Altium Limited
footprint HDR-M-1x37-2.54mm-180-9.2mm (Male Header, 1 line 37 rows, 180 degrees, 9.2 mm length)
footprint HDR-M-1x37-2.54mm-180-11.2mm (Male Header, 1 line 37 rows, 180 degrees, 11.2 mm length)
footprint HDR-M-1x37-2.54mm-180-11.6mm (Male Header, 1 line 37 rows, 180 degrees, 11.6 mm length)
footprint HDR-M-1x37-2.54mm-180-12.4mm (Male Header, 1 line 37 rows, 180 degrees, 12.4 mm length)
footprint HDR-M-1x37-2.54mm-180-13.6mm (Male Header, 1 line 37 rows, 180 degrees, 13.6 mm length)
footprint HDR-M-1x37-2.54mm-180-21.1mm (Male Header, 1 line 37 rows, 180 degrees, 21.1 mm length)
footprint HDR-F-1x37-2.54mm-180-8.7mm (Female Header, 1 line 37 rows, 180 degrees, 8.7 mm length)
pins: 1, 2, 3, 4, 5, 6, 7, 8, 9, 10, 11, 12, 13, 14, 15, 16, 17, 18, 19, 20, 21, 22, 23, 24, 25, 26, 27, 28, 29, 30, 31, 32, 33, 34, 35, 36, 37

## Header_1x38
designator P?
Header, 1 Line, 38 Columns, 38 Pins; LatestRevisionDate: 17-Jul-2002; LatestRevisionNote: Re-released for DXP Platform.; Publisher: Altium Limited
footprint HDR-M-1x38-2.54mm-180-9.2mm (Male Header, 1 line 38 rows, 180 degrees, 9.2 mm length)
footprint HDR-M-1x38-2.54mm-180-11.2mm (Male Header, 1 line 38 rows, 180 degrees, 11.2 mm length)
footprint HDR-M-1x38-2.54mm-180-11.6mm (Male Header, 1 line 38 rows, 180 degrees, 11.6 mm length)
footprint HDR-M-1x38-2.54mm-180-12.4mm (Male Header, 1 line 38 rows, 180 degrees, 12.4 mm length)
footprint HDR-M-1x38-2.54mm-180-13.6mm (Male Header, 1 line 38 rows, 180 degrees, 13.6 mm length)
footprint HDR-M-1x38-2.54mm-180-21.1mm (Male Header, 1 line 38 rows, 180 degrees, 21.1 mm length)
footprint HDR-F-1x38-2.54mm-180-8.7mm (Female Header, 1 line 38 rows, 180 degrees, 8.7 mm length)
pins: 1, 2, 3, 4, 5, 6, 7, 8, 9, 10, 11, 12, 13, 14, 15, 16, 17, 18, 19, 20, 21, 22, 23, 24, 25, 26, 27, 28, 29, 30, 31, 32, 33, 34, 35, 36, 37, 38

## Header_1x39
designator P?
Header, 1 Line, 39 Columns, 39 Pins; LatestRevisionDate: 17-Jul-2002; LatestRevisionNote: Re-released for DXP Platform.; Publisher: Altium Limited
footprint HDR-M-1x39-2.54mm-180-9.2mm (Male Header, 1 line 39 rows, 180 degrees, 9.2 mm length)
footprint HDR-M-1x39-2.54mm-180-11.2mm (Male Header, 1 line 39 rows, 180 degrees, 11.2 mm length)
footprint HDR-M-1x39-2.54mm-180-11.6mm (Male Header, 1 line 39 rows, 180 degrees, 11.6 mm length)
footprint HDR-M-1x39-2.54mm-180-12.4mm (Male Header, 1 line 39 rows, 180 degrees, 12.4 mm length)
footprint HDR-M-1x39-2.54mm-180-13.6mm (Male Header, 1 line 39 rows, 180 degrees, 13.6 mm length)
footprint HDR-M-1x39-2.54mm-180-21.1mm (Male Header, 1 line 39 rows, 180 degrees, 21.1 mm length)
footprint HDR-F-1x39-2.54mm-180-8.7mm (Female Header, 1 line 39 rows, 180 degrees, 8.7 mm length)
pins: 1, 2, 3, 4, 5, 6, 7, 8, 9, 10, 11, 12, 13, 14, 15, 16, 17, 18, 19, 20, 21, 22, 23, 24, 25, 26, 27, 28, 29, 30, 31, 32, 33, 34, 35, 36, 37, 38, 39

## Header_1x40
designator P?
Header, 1 Line, 40 Columns, 40 Pins; LatestRevisionDate: 17-Jul-2002; LatestRevisionNote: Re-released for DXP Platform.; Publisher: Altium Limited
footprint HDR-M-1x40-2.54mm-180-9.2mm (Male Header, 1 line 40 rows, 180 degrees, 9.2 mm length)
footprint HDR-M-1x40-2.54mm-180-11.2mm (Male Header, 1 line 40 rows, 180 degrees, 11.2 mm length)
footprint HDR-M-1x40-2.54mm-180-11.6mm (Male Header, 1 line 40 rows, 180 degrees, 11.6 mm length)
footprint HDR-M-1x40-2.54mm-180-12.4mm (Male Header, 1 line 40 rows, 180 degrees, 12.4 mm length)
footprint HDR-M-1x40-2.54mm-180-13.6mm (Male Header, 1 line 40 rows, 180 degrees, 13.6 mm length)
footprint HDR-M-1x40-2.54mm-180-21.1mm (Male Header, 1 line 40 rows, 180 degrees, 21.1 mm length)
footprint HDR-F-1x40-2.54mm-180-8.7mm (Female Header, 1 line 40 rows, 180 degrees, 8.7 mm length)
pins: 1, 2, 3, 4, 5, 6, 7, 8, 9, 10, 11, 12, 13, 14, 15, 16, 17, 18, 19, 20, 21, 22, 23, 24, 25, 26, 27, 28, 29, 30, 31, 32, 33, 34, 35, 36, 37, 38, 39, 40

## Header_2x2
designator P?
Header, 2 Lines, 2 Columns, 4 Pins; LatestRevisionDate: 17-Jul-2002; LatestRevisionNote: Re-released for DXP Platform.; Publisher: Altium Limited
footprint HDR-F-2x2-1.27mm-SMD-4.57mm (Female Header, 2 lines, 2 pins per line, SMD, 4.57 mm length; 3D ASSMANN WSW components)
footprint HDR-M-2x2-2.54mm-180-9.2mm (Male Header, 2 lines, 2 columns, 180 degrees, 9.2 mm length)
pins: 1, 2, 3, 4

## Header_2x3
designator P?
Header, 2 Lines, 3 Columns, 6 Pins; LatestRevisionDate: 17-Jul-2002; LatestRevisionNote: Re-released for DXP Platform.; Publisher: Altium Limited
footprint HDR-F-2x3-1.27mm-SMD-4.57mm (Female Header, 2 lines, 3 pins per line, SMD, 4.57 mm length; 3D ASSMANN WSW components)
footprint HDR-M-2x3-2.54mm-180-9.2mm (Male Header, 2 lines, 3 columns, 180 degrees, 9.2 mm length)
pins: 1, 2, 3, 4, 5, 6

## Header_2x4
designator P?
Header, 2 Lines, 4 Columns, 8 Pins; LatestRevisionDate: 17-Jul-2002; LatestRevisionNote: Re-released for DXP Platform.; Publisher: Altium Limited
footprint HDR-F-2x4-1.27mm-SMD-4.57mm (Female Header, 2 lines, 4 pins per line, SMD, 4.57 mm length; 3D ASSMANN WSW components)
footprint HDR-M-2x4-2.54mm-180-9.2mm (Male Header, 2 lines, 4 columns, 180 degrees, 9.2 mm length)
pins: 1, 2, 3, 4, 5, 6, 7, 8

## Header_2x5
designator P?
Header, 2 Lines, 5 Columns, 10 Pins; LatestRevisionDate: 17-Jul-2002; LatestRevisionNote: Re-released for DXP Platform.; Publisher: Altium Limited
footprint HDR-F-2x5-1.27mm-SMD-4.57mm (Female Header, 2 lines, 5 pins per line, SMD, 4.57 mm length; 3D ASSMANN WSW components)
footprint HDR-M-2x5-2.54mm-180-9.2mm (Male Header, 2 lines, 5 columns, 180 degrees, 9.2 mm length)
pins: 1, 2, 3, 4, 5, 6, 7, 8, 9, 10

## Header_2x6
designator P?
Header, 2 Lines, 6 Columns, 12 Pins; LatestRevisionDate: 17-Jul-2002; LatestRevisionNote: Re-released for DXP Platform.; Publisher: Altium Limited
footprint HDR-F-2x6-1.27mm-SMD-4.57mm (Female Header, 2 lines, 6 pins per line, SMD, 4.57 mm length; 3D ASSMANN WSW components)
footprint HDR-M-2x6-2.54mm-180-9.2mm (Male Header, 2 lines, 6 columns, 180 degrees, 9.2 mm length)
pins: 1, 2, 3, 4, 5, 6, 7, 8, 9, 10, 11, 12

## Header_2x7
designator P?
Header, 2 Lines, 7 Columns, 14 Pins; LatestRevisionDate: 17-Jul-2002; LatestRevisionNote: Re-released for DXP Platform.; Publisher: Altium Limited
footprint HDR-F-2x7-1.27mm-SMD-4.57mm (Female Header, 2 lines, 7 pins per line, SMD, 4.57 mm length; 3D ASSMANN WSW components)
pins: 1, 2, 3, 4, 5, 6, 7, 8, 9, 10, 11, 12, 13, 14

## Header_2x8
designator P?
Header, 2 Lines, 8 Columns, 16 Pins; LatestRevisionDate: 17-Jul-2002; LatestRevisionNote: Re-released for DXP Platform.; Publisher: Altium Limited
footprint HDR-F-2x8-1.27mm-SMD-4.57mm (Female Header, 2 lines, 8 pins per line, SMD, 4.57 mm length; 3D ASSMANN WSW components)
pins: 1, 2, 3, 4, 5, 6, 7, 8, 9, 10, 11, 12, 13, 14, 15, 16

## Header_2x9
designator P?
Header, 2 Lines, 9 Columns, 18 Pins; LatestRevisionDate: 17-Jul-2002; LatestRevisionNote: Re-released for DXP Platform.; Publisher: Altium Limited
footprint HDR-F-2x9-1.27mm-SMD-4.57mm (Female Header, 2 lines, 9 pins per line, SMD, 4.57 mm length; 3D ASSMANN WSW components)
pins: 1, 2, 3, 4, 5, 6, 7, 8, 9, 10, 11, 12, 13, 14, 15, 16, 17, 18

## Header_2x10
designator P?
Header, 2 Lines, 10 Columns, 20 Pins; LatestRevisionDate: 17-Jul-2002; LatestRevisionNote: Re-released for DXP Platform.; Publisher: Altium Limited
footprint HDR-F-2x10-1.27mm-SMD-4.57mm (Female Header, 2 lines, 10 pins per line, SMD, 4.57 mm length; 3D ASSMANN WSW components)
pins: 1, 2, 3, 4, 5, 6, 7, 8, 9, 10, 11, 12, 13, 14, 15, 16, 17, 18, 19, 20

## Header_2x11
designator P?
Header, 2 Lines, 11 Columns, 22 Pins; LatestRevisionDate: 17-Jul-2002; LatestRevisionNote: Re-released for DXP Platform.; Publisher: Altium Limited
footprint HDR-F-2x11-1.27mm-SMD-4.57mm (Female Header, 2 lines, 11 pins per line, SMD, 4.57 mm length; 3D ASSMANN WSW components)
pins: 1, 2, 3, 4, 5, 6, 7, 8, 9, 10, 11, 12, 13, 14, 15, 16, 17, 18, 19, 20, 21, 22

## Header_2x12
designator P?
Header, 2 Lines, 12 Columns, 24 Pins; LatestRevisionDate: 17-Jul-2002; LatestRevisionNote: Re-released for DXP Platform.; Publisher: Altium Limited
footprint HDR-F-2x12-1.27mm-SMD-4.57mm (Female Header, 2 lines, 12 pins per line, SMD, 4.57 mm length; 3D ASSMANN WSW components)
pins: 1, 2, 3, 4, 5, 6, 7, 8, 9, 10, 11, 12, 13, 14, 15, 16, 17, 18, 19, 20, 21, 22, 23, 24

## Header_2x13
designator P?
Header, 2 Lines, 13 Columns, 26 Pins; LatestRevisionDate: 17-Jul-2002; LatestRevisionNote: Re-released for DXP Platform.; Publisher: Altium Limited
footprint HDR-F-2x13-1.27mm-SMD-4.57mm (Female Header, 2 lines, 13 pins per line, SMD, 4.57 mm length; 3D ASSMANN WSW components)
pins: 1, 2, 3, 4, 5, 6, 7, 8, 9, 10, 11, 12, 13, 14, 15, 16, 17, 18, 19, 20, 21, 22, 23, 24, 25, 26

## Header_2x14
designator P?
Header, 2 Lines, 14 Columns, 28 Pins; LatestRevisionDate: 17-Jul-2002; LatestRevisionNote: Re-released for DXP Platform.; Publisher: Altium Limited
footprint HDR-F-2x14-1.27mm-SMD-4.57mm (Female Header, 2 lines, 14 pins per line, SMD, 4.57 mm length; 3D ASSMANN WSW components)
pins: 1, 2, 3, 4, 5, 6, 7, 8, 9, 10, 11, 12, 13, 14, 15, 16, 17, 18, 19, 20, 21, 22, 23, 24, 25, 26, 27, 28

## Header_2x15
designator P?
Header, 2 Lines, 15 Columns, 30 Pins; LatestRevisionDate: 17-Jul-2002; LatestRevisionNote: Re-released for DXP Platform.; Publisher: Altium Limited
footprint HDR-F-2x15-1.27mm-SMD-4.57mm (Female Header, 2 lines, 15 pins per line, SMD, 4.57 mm length; 3D ASSMANN WSW components)
pins: 1, 2, 3, 4, 5, 6, 7, 8, 9, 10, 11, 12, 13, 14, 15, 16, 17, 18, 19, 20, 21, 22, 23, 24, 25, 26, 27, 28, 29, 30

## Header_2x16
designator P?
Header, 2 Lines, 16 Columns, 32 Pins; LatestRevisionDate: 17-Jul-2002; LatestRevisionNote: Re-released for DXP Platform.; Publisher: Altium Limited
footprint HDR-F-2x16-1.27mm-SMD-4.57mm (Female Header, 2 lines, 16 pins per line, SMD, 4.57 mm length; 3D ASSMANN WSW components)
footprint HDR-M-2x16-2.54mm-180-9.2mm (Male Header, 2 lines, 16 columns, 180 degrees, 9.2 mm length)
pins: 1, 2, 3, 4, 5, 6, 7, 8, 9, 10, 11, 12, 13, 14, 15, 16, 17, 18, 19, 20, 21, 22, 23, 24, 25, 26, 27, 28, 29, 30, 31, 32

## Header_2x17
designator P?
Header, 2 Lines, 17 Columns, 34 Pins; LatestRevisionDate: 17-Jul-2002; LatestRevisionNote: Re-released for DXP Platform.; Publisher: Altium Limited
footprint HDR-F-2x17-1.27mm-SMD-4.57mm (Female Header, 2 lines 17 rows, SMD, 4.57 mm length)
pins: 1, 2, 3, 4, 5, 6, 7, 8, 9, 10, 11, 12, 13, 14, 15, 16, 17, 18, 19, 20, 21, 22, 23, 24, 25, 26, 27, 28, 29, 30, 31, 32, 33, 34

## Header_2x18
designator P?
Header, 2 Lines, 18 Columns, 36 Pins; LatestRevisionDate: 17-Jul-2002; LatestRevisionNote: Re-released for DXP Platform.; Publisher: Altium Limited
footprint HDR-F-2x18-1.27mm-SMD-4.57mm (Female Header, 2 lines, 18 pins per line, SMD, 4.57 mm length; 3D ASSMANN WSW components)
pins: 1, 2, 3, 4, 5, 6, 7, 8, 9, 10, 11, 12, 13, 14, 15, 16, 17, 18, 19, 20, 21, 22, 23, 24, 25, 26, 27, 28, 29, 30, 31, 32, 33, 34, 35, 36

## Header_2x19
designator P?
Header, 2 Lines, 19 Columns, 38 Pins; LatestRevisionDate: 17-Jul-2002; LatestRevisionNote: Re-released for DXP Platform.; Publisher: Altium Limited
footprint HDR-F-2x19-1.27mm-SMD-4.57mm (Female Header, 2 lines, 19 pins per line, SMD, 4.57 mm length; 3D ASSMANN WSW components)
pins: 1, 2, 3, 4, 5, 6, 7, 8, 9, 10, 11, 12, 13, 14, 15, 16, 17, 18, 19, 20, 21, 22, 23, 24, 25, 26, 27, 28, 29, 30, 31, 32, 33, 34, 35, 36, 37, 38

## Header_2x20
designator P?
Header, 2 Lines, 20 Columns, 40 Pins; LatestRevisionDate: 17-Jul-2002; LatestRevisionNote: Re-released for DXP Platform.; Publisher: Altium Limited
footprint HDR-M-2x20-2.54mm-180-9.2mm (Male Header, 2 lines 20 rows, 180 degrees, 9.2 mm length)
footprint HDR-F-2x20-1.27mm-SMD-4.57mm (Female Header, 2 lines, 20 pins per line, SMD, 4.57 mm length; 3D ASSMANN WSW components)
pins: 1, 2, 3, 4, 5, 6, 7, 8, 9, 10, 11, 12, 13, 14, 15, 16, 17, 18, 19, 20, 21, 22, 23, 24, 25, 26, 27, 28, 29, 30, 31, 32, 33, 34, 35, 36, 37, 38, 39, 40

## Header_2x21
designator P?
Header, 2 Lines, 21 Columns, 42 Pins; LatestRevisionDate: 17-Jul-2002; LatestRevisionNote: Re-released for DXP Platform.; Publisher: Altium Limited
footprint HDR-F-2x21-1.27mm-SMD-4.57mm (Female Header, 2 lines, 21 pins per line, SMD, 4.57 mm length; 3D ASSMANN WSW components)
pins: 1, 2, 3, 4, 5, 6, 7, 8, 9, 10, 11, 12, 13, 14, 15, 16, 17, 18, 19, 20, 21, 22, 23, 24, 25, 26, 27, 28, 29, 30, 31, 32, 33, 34, 35, 36, 37, 38, 39, 40, 41, 42

## Header_2x22
designator P?
Header, 2 Lines, 22 Columns, 44 Pins; LatestRevisionDate: 17-Jul-2002; LatestRevisionNote: Re-released for DXP Platform.; Publisher: Altium Limited
footprint HDR-F-2x22-1.27mm-SMD-4.57mm (Female Header, 2 lines, 22 pins per line, SMD, 4.57 mm length; 3D ASSMANN WSW components)
pins: 1, 2, 3, 4, 5, 6, 7, 8, 9, 10, 11, 12, 13, 14, 15, 16, 17, 18, 19, 20, 21, 22, 23, 24, 25, 26, 27, 28, 29, 30, 31, 32, 33, 34, 35, 36, 37, 38, 39, 40, 41, 42, 43, 44

## Header_2x23
designator P?
Header, 2 Lines, 23 Columns, 46 Pins; LatestRevisionDate: 17-Jul-2002; LatestRevisionNote: Re-released for DXP Platform.; Publisher: Altium Limited
footprint HDR-F-2x23-1.27mm-SMD-4.57mm (Female Header, 2 lines, 23 pins per line, SMD, 4.57 mm length; 3D ASSMANN WSW components)
pins: 1, 2, 3, 4, 5, 6, 7, 8, 9, 10, 11, 12, 13, 14, 15, 16, 17, 18, 19, 20, 21, 22, 23, 24, 25, 26, 27, 28, 29, 30, 31, 32, 33, 34, 35, 36, 37, 38, 39, 40, 41, 42, 43, 44, 45, 46

## Header_2x24
designator P?
Header, 2 Lines, 24 Columns, 48 Pins; LatestRevisionDate: 17-Jul-2002; LatestRevisionNote: Re-released for DXP Platform.; Publisher: Altium Limited
footprint HDR-F-2x24-1.27mm-SMD-4.57mm (Female Header, 2 lines, 24 pins per line, SMD, 4.57 mm length; 3D ASSMANN WSW components)
pins: 1, 2, 3, 4, 5, 6, 7, 8, 9, 10, 11, 12, 13, 14, 15, 16, 17, 18, 19, 20, 21, 22, 23, 24, 25, 26, 27, 28, 29, 30, 31, 32, 33, 34, 35, 36, 37, 38, 39, 40, 41, 42, 43, 44, 45, 46, 47, 48

## Header_2x25
designator P?
Header, 2 Lines, 25 Columns, 50 Pins; LatestRevisionDate: 17-Jul-2002; LatestRevisionNote: Re-released for DXP Platform.; Publisher: Altium Limited
footprint HDR-F-2x25-1.27mm-SMD-4.57mm (Female Header, 2 lines, 25 pins per line, SMD, 4.57 mm length; 3D ASSMANN WSW components)
pins: 1, 2, 3, 4, 5, 6, 7, 8, 9, 10, 11, 12, 13, 14, 15, 16, 17, 18, 19, 20, 21, 22, 23, 24, 25, 26, 27, 28, 29, 30, 31, 32, 33, 34, 35, 36, 37, 38, 39, 40, 41, 42, 43, 44, 45, 46, 47, 48, 49, 50

## KRE_2
designator P?, comment Terminal
Terminal Block 1x2
footprint KRE_2 (Terminal Block 2 pins)
pins: 1, 2

## KRE_3
designator P?, comment Terminal
Terminal Block 1x3
footprint KRE_3 (Terminal Block 3 pins)
pins: 1, 2, 3

## KRE_4
designator P?, comment Terminal
Terminal Block 1x4
footprint KRE_4 (Terminal Block 4 pins)
pins: 1, 2, 3, 4

## KRE_5
designator P?, comment Terminal
Terminal Block 1x5
footprint KRE_5 (Terminal Block 5 pins)
pins: 1, 2, 3, 4, 5

## KRE_6
designator P?, comment Terminal
Terminal Block 1x6
footprint KRE_6 (Terminal Block 6 pins)
pins: 1, 2, 3, 4, 5, 6

## KRE_7
designator P?, comment Terminal
Terminal Block 1x7
footprint KRE_7 (Terminal Block 7 pins)
pins: 1, 2, 3, 4, 5, 6, 7

## KRE_8
designator P?, comment Terminal
Terminal Block 1x8
footprint KRE_8 (Terminal Block 8 pins)
pins: 1, 2, 3, 4, 5, 6, 7, 8

## KRE_9
designator P?, comment Terminal
Terminal Block 1x9
footprint KRE_9 (Terminal Block 9 pins)
pins: 1, 2, 3, 4, 5, 6, 7, 8, 9

## KRE_10
designator P?, comment Terminal
Terminal Block 1x10
footprint KRE_10 (Terminal Block 10 pins)
pins: 1, 2, 3, 4, 5, 6, 7, 8, 9, 10

## KRE_11
designator P?, comment Terminal
Terminal Block 1x11
footprint KRE_11 (Terminal Block 11 pins)
pins: 1, 2, 3, 4, 5, 6, 7, 8, 9, 10, 11

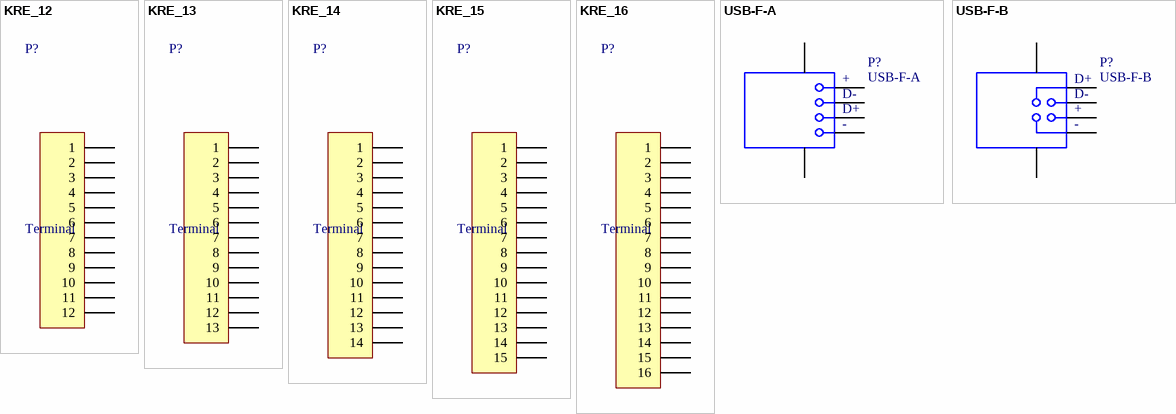
[diagram p17: symbols KRE_12 to USB-F-B]

## KRE_12
designator P?, comment Terminal
Terminal Block 1x12
footprint KRE_12 (Terminal Block 12 pins)
pins: 1, 2, 3, 4, 5, 6, 7, 8, 9, 10, 11, 12

## KRE_13
designator P?, comment Terminal
Terminal Block 1x13
footprint KRE_13 (Terminal Block 13 pins)
pins: 1, 2, 3, 4, 5, 6, 7, 8, 9, 10, 11, 12, 13

## KRE_14
designator P?, comment Terminal
Terminal Block 1x14
footprint KRE_14 (Terminal Block 14 pins)
pins: 1, 2, 3, 4, 5, 6, 7, 8, 9, 10, 11, 12, 13, 14

## KRE_15
designator P?, comment Terminal
Terminal Block 1x15
footprint KRE_15 (Terminal Block 15 pins)
pins: 1, 2, 3, 4, 5, 6, 7, 8, 9, 10, 11, 12, 13, 14, 15

## KRE_16
designator P?, comment Terminal
Terminal Block 1x16
footprint KRE_16 (Terminal Block 16 pins)
pins: 1, 2, 3, 4, 5, 6, 7, 8, 9, 10, 11, 12, 13, 14, 15, 16

## USB-F-A
designator P?
USB Female connector, Type A
footprint USB-F-A-DIP (USB Female connector, Type A, DIP)
pins: 1 +, 2 D-, 3 D+, 4 -, 5, 6

## USB-F-B
designator P?
USB Female connector, Type B
footprint USB-F-B-DIP (USB Female connector, Type B, DIP)
pins: 1 +, 2 D-, 3 D+, 4 -, 5, 6


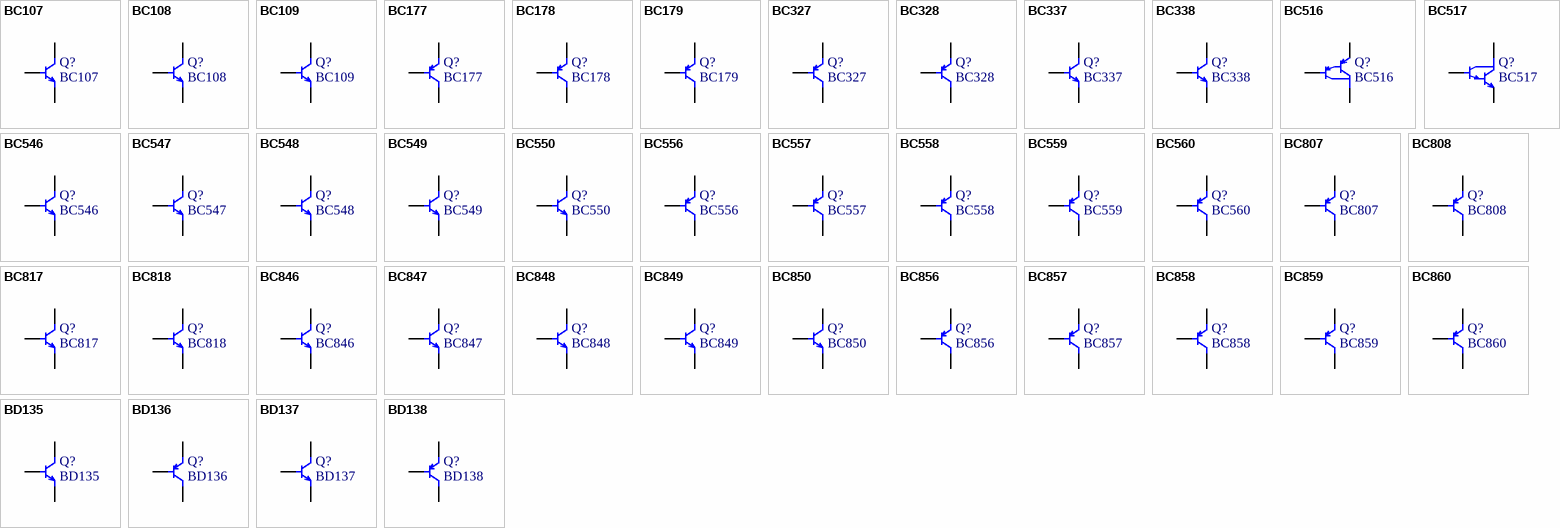
[diagram p18: symbols BC107 to BD138]

## BC107
designator Q?
NPN Bipolar Transistor; Complementary Part: BC177; Collector-Base Voltage (Vcb): 50 V; Collector-Emitter Voltage (Vce): 45 V; Emitter-Base Voltage (Veb): 6 V; Collector Current (Ic): 100 mA; Collector Peak Current (Icp): 200 mA; Total Power Dissipation (Ptot): 300 mW; DC Current Gain Min (hfe): 110; DC Current Gain Max (hfe): 450; Transition Frequency (fT): 100 MHz; Base Peak Current (Ibp): 200 mA
footprint TO-18/EBC (Transistor EBC)
pins: B, C, E

## BC108
designator Q?
NPN Bipolar Transistor; Complementary Part: BC178; Collector-Base Voltage (Vcb): 30 V; Collector-Emitter Voltage (Vce): 20 V; Emitter-Base Voltage (Veb): 5 V; Collector Current (Ic): 100 mA; Collector Peak Current (Icp): 200 mA; Total Power Dissipation (Ptot): 300 mW; DC Current Gain Min (hfe): 110; DC Current Gain Max (hfe): 800; Transition Frequency (fT): 100 MHz; Base Peak Current (Ibp): 200 mA
footprint TO-18/EBC (Transistor EBC)
pins: B, C, E